# Altium footprint library IC.PcbLib: 204 footprints (part 1 of 13)
Each footprint in its own frame and in the unit in brackets; x right, y up, seen from the top. Pads: shape width x height; smd on the part's side, far side on the other; paste and mask are expansions set on the pad; w line width, h text height; cw(c..) or ccw(c..) is an arc to the next point about the centre after c.
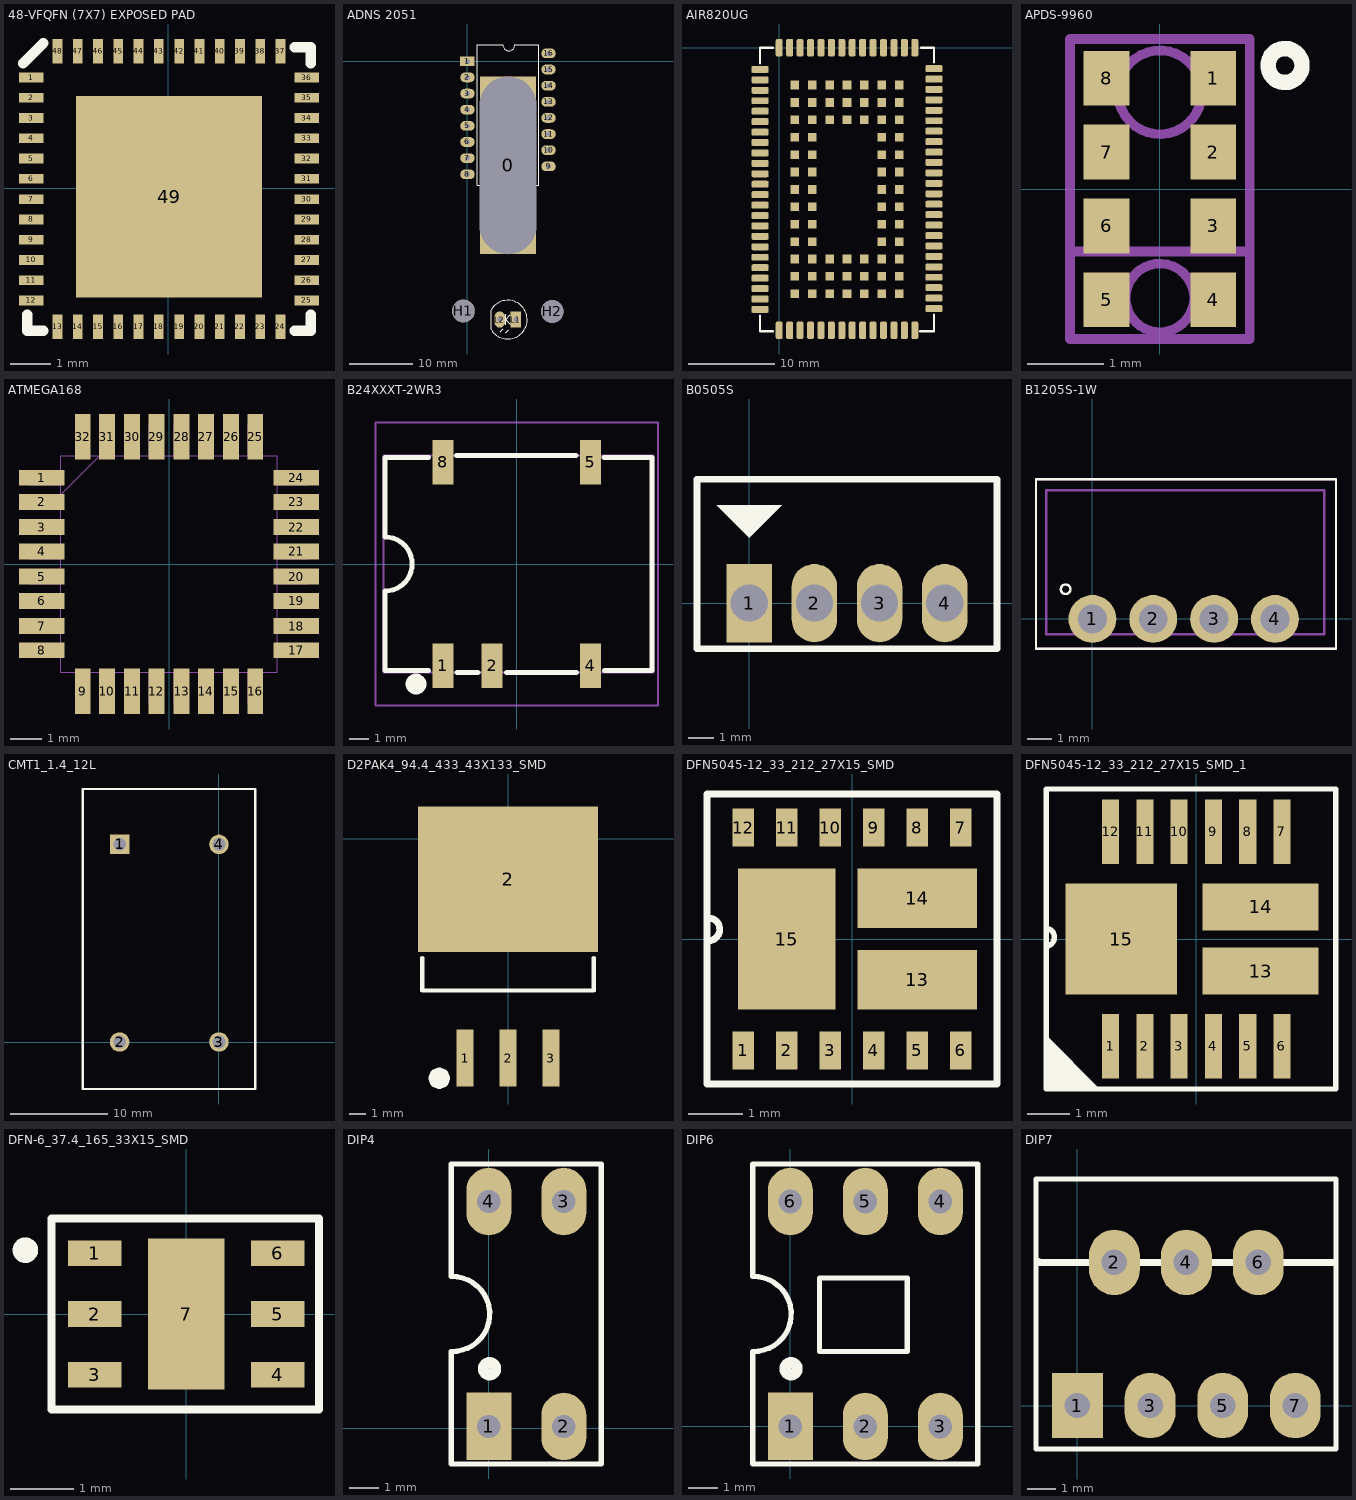
[diagram p0: the footprints below, top view; thin cyan lines are the x and y axes]

## 48-VFQFN (7X7) EXPOSED PAD [mm]
pads (49):
  rect 0.6x0.24 smd: 1(-3.386,2.737) 2(-3.386,2.237) 3(-3.386,1.737) 4(-3.386,1.237) 5(-3.386,0.737) 6(-3.386,0.237) 7(-3.386,-0.263) 8(-3.386,-0.763) 9(-3.386,-1.263) 10(-3.386,-1.763) 11(-3.386,-2.263) 12(-3.386,-2.763) 25(3.413,-2.763) 26(3.413,-2.263) 27(3.413,-1.763) 28(3.413,-1.263) 29(3.413,-0.763) 30(3.413,-0.263) 31(3.413,0.237) 32(3.413,0.737) 33(3.413,1.237) 34(3.413,1.737) 35(3.413,2.237) 36(3.413,2.737)
  rect 0.24x0.6 smd: 13(-2.737,-3.413) 14(-2.237,-3.413) 15(-1.737,-3.413) 16(-1.237,-3.413) 17(-0.737,-3.413) 18(-0.237,-3.413) 19(0.263,-3.413) 20(0.763,-3.413) 21(1.263,-3.413) 22(1.763,-3.413) 23(2.263,-3.413) 24(2.764,-3.413) 37(2.764,3.386) 38(2.263,3.386) 39(1.763,3.386) 40(1.263,3.386) 41(0.763,3.386) 42(0.263,3.386) 43(-0.237,3.386) 44(-0.737,3.386) 45(-1.237,3.386) 46(-1.737,3.386) 47(-2.237,3.386) 48(-2.737,3.386)
  rect 4.6x4.975 smd: 49(0.014,-0.202)
Top Overlay:
  lines w0.254: -3.586,3.086 -3.086,3.586 ; -3.486,-3.115 -3.486,-3.513 -3.088,-3.513 ; 3.115,-3.513 3.513,-3.513 3.513,-3.115 ; 3.115,3.486 3.513,3.486 3.513,3.088
3D body "TB67S289FTG P-VQFN48-0707-0.50-004.STEP": height -0.3, standoff -1.3, extent -3.55,-3.55 3.55,3.55

## ADNS 2051 [mil] "Foots pin for Mouse"
pads (21):
  rect 350x1100 hole 350 slot 1100 at 90 deg: 0(251,-645)
  rect 90x60 hole 31: 1(0,0)
  oval 90x60 hole 31: 2(0,-100) 3(0,-200) 4(0,-300) 5(0,-400) 6(0,-500) 7(0,-600) 8(0,-700) 9(502,-651) 10(502,-551) 11(502,-451) 12(502,-351) 13(502,-251) 14(502,-151) 15(502,-51) 16(502,49)
  round 140 hole 140: H1(-25,-1547) H2(525,-1550)
  rect 65x100 hole 32: L1(300,-1600.5)
  oval 65x100 hole 32: L2(200,-1600.5)
Top Overlay:
  lines w7: 146,-1660.5 146,-1541.5 ; 146.06,-1540.53 cw(c250,-1600.5) 146.49,-1661.21 ; 204,-1675.5 221,-1658.5 ; 218,103 59,103 59,-767 443,-767 443,103 296,103 ; 218.97,101 ccw(c255.99,101) 293,101 ; 236,-1632.5 236,-1566.5 ; 238,-1681.5 255,-1664.5 ; 265,-1629.5 236,-1600.5 265,-1571.5 ; 394.94,-516.95 ccw(c252.8,-525.96) 395,-518
  text "ADNS2051" at 108,-229 h40

## AIR820UG [mm]
pads (146):
  rrect50% 2x0.8 smd: 1(-2.2,-2.5) 2(-2.2,-3.7) 3(-2.2,-4.9) 4(-2.2,-6.1) 5(-2.2,-7.3) 6(-2.2,-8.5) 7(-2.2,-9.7) 8(-2.2,-10.9) 9(-2.2,-12.1) 10(-2.2,-13.3) 11(-2.2,-14.5) 12(-2.2,-15.7) 13(-2.2,-16.9) 14(-2.2,-18.1) 15(-2.2,-19.3) 16(-2.2,-20.5) 17(-2.2,-21.7) 18(-2.2,-22.9) 19(-2.2,-24.1) 20(-2.2,-25.3) 21(-2.2,-26.5) 22(-2.2,-27.7) 23(-2.2,-28.9) 24(-2.2,-30.1) 39(17.8,-30) 40(17.8,-28.8) 41(17.8,-27.6) 42(17.8,-26.4) 43(17.8,-25.2) 44(17.8,-24) 45(17.8,-22.8) 46(17.8,-21.6) 47(17.8,-20.4) 48(17.8,-19.2) 49(17.8,-18) 50(17.8,-16.8) 51(17.8,-15.6) 52(17.8,-14.4) 53(17.8,-13.2) 54(17.8,-12) 55(17.8,-10.8) 56(17.8,-9.6) 57(17.8,-8.4) 58(17.8,-7.2) 59(17.8,-6) 60(17.8,-4.8) 61(17.8,-3.6) 62(17.8,-2.4)
  rrect50% 0.8x2 smd: 25(0,-32.5) 26(1.2,-32.5) 27(2.4,-32.5) 28(3.6,-32.5) 29(4.8,-32.5) 30(6,-32.5) 31(7.2,-32.5) 32(8.4,-32.5) 33(9.6,-32.5) 34(10.8,-32.5) 35(12,-32.5) 36(13.2,-32.5) 37(14.4,-32.5) 38(15.6,-32.5) 63(15.6,0) 64(14.4,0) 65(13.2,0) 66(12,0) 67(10.8,0) 68(9.6,0) 69(8.4,0) 70(7.2,0) 71(6,0) 72(4.8,0) 73(3.6,0) 74(2.4,0) 75(1.2,0) 76(0,0)
  rect 1x1 smd: 77(1.8,-4.3) 78(3.8,-4.3) 79(5.8,-4.3) 80(7.8,-4.3) 81(9.8,-4.3) 82(11.8,-4.3) 83(13.8,-4.3) 84(1.8,-6.3) 85(3.8,-6.3) 86(5.8,-6.3) 87(7.8,-6.3) 88(9.8,-6.3) 89(11.8,-6.3) 90(13.8,-6.3) 91(1.8,-8.3) 92(3.8,-8.3) 93(5.8,-8.3) 94(7.8,-8.3) 95(9.8,-8.3) 96(11.8,-8.3) 97(13.8,-8.3) 98(1.8,-10.3) 99(3.8,-10.3) 100(11.8,-10.3) 101(13.8,-10.3) 102(1.8,-12.3) 103(3.8,-12.3) 104(11.8,-12.3) 105(13.8,-12.3) 106(1.8,-14.3) 107(3.8,-14.3) 108(11.8,-14.3) 109(13.8,-14.3) 110(1.8,-16.3) 111(3.8,-16.3) 112(11.8,-16.3) 113(13.8,-16.3) 114(1.8,-18.3) 115(3.8,-18.3) 116(11.8,-18.3) 117(13.8,-18.3) 118(1.8,-20.3) 119(3.8,-20.3) 120(11.8,-20.3) 121(13.8,-20.3) 122(1.8,-22.3) 123(3.8,-22.3) 124(11.8,-22.3) 125(13.8,-22.3) 126(1.8,-24.3) 127(3.8,-24.3) 128(5.8,-24.3) 129(7.8,-24.3) 130(9.8,-24.3) 131(11.8,-24.3) 132(13.8,-24.3) 133(1.8,-26.3) 134(3.8,-26.3) 135(5.8,-26.3) 136(7.8,-26.3) 137(9.8,-26.3) 138(11.8,-26.3) 139(13.8,-26.3) 140(1.8,-28.3) 141(3.8,-28.3) 142(5.8,-28.3) 143(7.8,-28.3) 144(9.8,-28.3) 145(11.8,-28.3) 146(13.8,-28.3)
Top Overlay:
  lines w0.254: -2.2,-30.8 -2.2,-32.6 -0.7,-32.6 ; -2.2,-1.8 -2.2,0 -0.7,0 ; 16.2,-32.6 17.8,-32.6 17.8,-30.7 ; 16.3,0 17.8,0 17.8,-1.7

## APDS-9960 [mm]
pads (8):
  rect 0.6x0.72 smd: 1(0.7,1.455) 2(0.7,0.485) 3(0.7,-0.485) 4(0.7,-1.455) 5(-0.7,-1.455) 6(-0.7,-0.485) 7(-0.7,0.485) 8(-0.7,1.455)
Top Overlay:
  circle w0.203: c1.644,1.622 r0.223
Mechanical 13:
  circle w0.127: c0,-1.43 r0.45
  circle w0.127: c0,1.27 r0.55
  lines w0.127: -1.18,-0.82 1.18,-0.82 ; -1.18,-0.82 -1.18,-1.97 1.18,-1.97 1.18,-0.82 ; -1.18,-0.82 -1.18,1.97 1.18,1.97 1.18,-0.82
3D body "step_temp.STEP": height 1.55, standoff 0, extent -1.18,-1.97 1.18,1.97

## ATMEGA168 [mil]
pads (32):
  rect 58x20 smd: 1(-162,110) 2(-162,79) 3(-162,47) 4(-162,16) 5(-162,-16) 6(-162,-47) 7(-162,-79) 8(-162,-110) 17(162,-110) 18(162,-79) 19(162,-47) 20(162,-16) 21(162,16) 22(162,47) 23(162,79) 24(162,110)
  rect 20x58 smd: 9(-110,-162) 10(-79,-162) 11(-47,-162) 12(-16,-162) 13(16,-162) 14(47,-162) 15(79,-162) 16(110,-162) 25(110,162) 26(79,162) 27(47,162) 28(16,162) 29(-16,162) 30(-47,162) 31(-79,162) 32(-110,162)
Mechanical 13:
  drawing of 169 lines, arcs and shapes, not listed
3D body "ATMEGA168-20AU.STEP": height 46.67, standoff -0.57, extent -177.16,-177.16 177.17,177.16

## B24XXXT-2WR3 [mm]
pads (5):
  rect 1.1x2.3 smd paste+0 mask+0.05: 1(-3.81,-5.25) 2(-1.27,-5.25) 4(3.81,-5.25) 5(3.81,5.25) 8(-3.81,5.25)
Top Overlay:
  circle w0.6: c-5.2,-6.2 r0.236
  lines w0.254: -6.8,-1.4 -6.8,-5.5 -4.541,-5.5 ; -6.8,-1.397 ccw(c-6.8,0) -6.8,1.397 ; -6.8,1.4 -6.8,5.5 -4.541,5.5 ; -3.1,5.6 3.058,5.6 ; -3.078,-5.6 -2,-5.6 ; -0.518,-5.6 3.1,-5.6 ; 4.5,5.5 7,5.5 7,-5.5 4.541,-5.5
Top Assembly:
  lines w0.1: -6.875,-5.6 7.075,-5.6 7.075,5.6 -6.875,5.6 -6.875,-5.6
the flat projection:
  lines w0.1: 7.3,-7.3 7.3,7.3 ; 7.3,-7.3 -7.3,-7.3 -7.3,7.3 7.3,7.3 ; 7.3,-7.3 7.3,-6.2 7.3,7.3
  text "+" at -0.1,-0.152 h0.5
Mechanical 29:
  text ".Designator" at -3.2,0.988 h1.52
3D body "B2424XT-2WR3_CHUAN_3D.stp": height 7.25, standoff 0, extent -6.975,-5.6 6.975,5.6

## B0505S [mil]
pads (4):
  rect 70x120 hole 57: 1(0,0)
  oval 70x120 hole 57: 2(100,0) 3(200,0) 4(300,0)
Top Overlay:
  region: -50,150 50,150 0,100
  lines w10: -80,-70 380,-70 380,190 -80,190 -80,-60 -80,-70
3D body "B0505s.step": height 393.7, standoff -141.73, extent -76.38,-50 376.38,186.22

## B1205S-1W [mm]
pads (4):
  round 2 hole 1.2: 1(0,0) 2(2.54,0) 3(5.08,0) 4(7.62,0)
Top Overlay:
  circle w0.1: c-1.116,1.24 r0.2
  lines w0.1: -2.356,-1.24 -2.356,5.828 10.168,5.828 10.168,-1.24 -2.356,-1.24
Top Assembly:
  lines w0.1: -1.928,-0.632 -1.928,5.368 9.672,5.368 9.672,-0.632 -1.928,-0.632
Mechanical 15:
  lines w0.1: -2.356,-1.24 -2.356,5.828 10.168,5.828 10.168,-1.24 -2.356,-1.24
  text "+" at 3.602,2.071 h1
3D body "-B1205S-1W.stp": height 10.1, standoff -4.1, extent -1.928,-0.632 9.672,5.368

## CMT1_1.4_12L [mm] "CASE: TH"
height 33
pads (4):
  rect 2x2 hole 1.3: 1(-10.2,20.3)
  round 2 hole 1.3: 2(-10.2,0) 3(0,0) 4(0,20.3)
Top Overlay:
  lines w0.254: -13.995,-4.826 -13.995,20.195 -13.995,25.984 3.734,25.984 3.734,-4.826 -13.995,-4.826
3D body: height 33, standoff 0.1, extent -13.741,-4.521 3.531,25.781

## D2PAK4_94.4_433_43X133_SMD [mm]
pads (5):
  rect 1x3.4 smd: 1(-2.54,-13) 2(0,-13) 3(2.54,-13)
  rect 10.7x8.6 smd: 2(0,-2.4)
  round 1.27 on Top Overlay: ""(-4.075,-14.2)
Top Overlay:
  lines w0.254: -5.08,-7.067 -5.08,-9 5.08,-9 5.08,-7.067
3D body "User Library-TO263-3-1.STEP": height 4.6, standoff -0.03, extent -5.193,-13.894 5.207,1.956

## DFN5045-12_33_212_27X15_SMD [mm] "CASE: DFN5045"
height 0.8
pads (15):
  rect 0.4x0.7 smd: 1(-2,-2.05) 2(-1.2,-2.05) 3(-0.4,-2.05) 4(0.4,-2.05) 5(1.2,-2.05) 6(2,-2.05) 7(2,2.05) 8(1.2,2.05) 9(0.4,2.05) 10(-0.4,2.05) 11(-1.2,2.05) 12(-2,2.05)
  rect 2.2x1.1 smd: 13(1.2,-0.75) 14(1.2,0.75)
  rect 1.8x2.6 smd: 15(-1.2,0)
Top Overlay:
  lines w0.127: -2.623,0.386 cw(c-2.642,0.178) -2.601,-0.028 ; -2.667,-2.667 2.667,-2.667 2.667,2.667 -2.667,2.667 -2.667,-2.667
3D body "DMHT6016LFJ-13.stp": height 0.9, standoff 0, extent -2.5,-2.36 2.5,2.36

## DFN5045-12_33_212_27X15_SMD_1 [mm] "CASE: DFN5045"
height 0.8
pads (15):
  rect 0.4x1.5 smd: 1(-2,-2.5) 2(-1.2,-2.5) 3(-0.4,-2.5) 4(0.4,-2.5) 5(1.2,-2.5) 6(2,-2.5) 7(2,2.5) 8(1.2,2.5) 9(0.4,2.5) 10(-0.4,2.5) 11(-1.2,2.5) 12(-2,2.5)
  rect 2.7x1.1 smd: 13(1.5,-0.75) 14(1.5,0.75)
  rect 2.6x2.6 smd: 15(-1.75,0)
Top Overlay:
  region: -3.5,-2.25 -2.25,-3.5 -3.5,-3.5
  lines w0.127: -3.5,0.25 cw(c-3.519,0.041) -3.478,-0.164 ; -3.5,-3.5 3.25,-3.5 3.25,3.5 -3.5,3.5 -3.5,-3.5
3D body "DMHT6016LFJ-13.stp": height 0.9, standoff 0, extent -2.5,-2.36 2.5,2.36

## DFN-6_37.4_165_33X15_SMD [mm] "DFN Package"
height 0.6
pads (7):
  rect 0.84x0.4 smd mask+0.076: 1(-1.435,0.95) 2(-1.435,0) 3(-1.435,-0.95) 4(1.435,-0.95) 5(1.435,0) 6(1.435,0.95)
  rect 1.2x2.365 smd mask+0.076: 7(0,0)
Top Overlay:
  circle w0.2: c-2.52,1 r0.1
  lines w0.127: 1.435,1.5 2.081,1.5 2.083,1.499 2.083,-1.499 2.081,-1.5 1.5,-1.5 -1.5,-1.5 -2.108,-1.5 -2.108,1.5 -1.5,1.5 1.5,1.5
Top Paste:
  region: -0.57,0.83 0.57,0.83 0.57,-0.83 -0.57,-0.83
3D body "User Library-DFN6-3x3x0_80.step": height 0.85, standoff 0.05, extent -1.5,-1.5 1.5,1.5

## DIP4 [mil] "W.300/L.400"
height 220.08
pads (4):
  rect 60x90 hole 31: 1(0,2.52)
  oval 60x90 hole 31: 2(100,2.52) 3(100,302.52) 4(0,302.52)
Top Overlay:
  circle w15: c1,79.52 r8
  lines w7: -50.38,102.57 ccw(c-48.68,152.54) -50,202.52 ; -50,102.52 -50,-47.48 150,-47.48 150,352.52 -50,352.52 -50,203.52
3D body "SW3DPS-DIP4-DEFAULT.STEP": height 169.69, standoff -129.13, extent -59.05,-7.48 159.06,307.48

## DIP6 [mil] "6 PIN, W 300mil, Pin to pin 100mil"
height 100
pads (6):
  rect 60x90 hole 31.5: 1(0,0)
  oval 60x90 hole 31.5: 2(100,0) 3(200,0) 4(200,300) 5(100,300) 6(0,300)
Top Overlay:
  circle w15: c1,77 r8
  lines w7: -50.38,100.05 ccw(c-48.69,150.02) -50,200 ; -50,100 -50,-50 250,-50 250,350 -50,350 -50,201 ; 39,100 156,100 156,198 39,198 39,100
3D body "SW3DPS-DIP6-DEFAULT.STEP": height 169.69, standoff -129.13, extent -58.11,-7.48 260,307.48

## DIP7 [mil]
pads (7):
  rect 70x90 hole 35: 1(0,0)
  oval 70x90 hole 35: 2(51,197) 3(100,0) 4(150,197) 5(200,0) 6(249,197) 7(300,0)
Top Overlay:
  lines w7: -57,-60 356,-60 356,312 -57,312 -57,-60
  lines w10: -54,198 -54,197 354,197
3D body "User Library-TO-220(T).STEP": height 756.77, standoff -77.87, extent -50.57,-11.02 351,311.02